# Altium footprint library 8x8LEDMATRIX.PcbLib: 1 footprints
Each footprint in its own frame and in the unit in brackets; x right, y up, seen from the top. Pads: shape width x height; smd on the part's side, far side on the other; paste and mask are expansions set on the pad; w line width, h text height; cw(c..) or ccw(c..) is an arc to the next point about the centre after c.
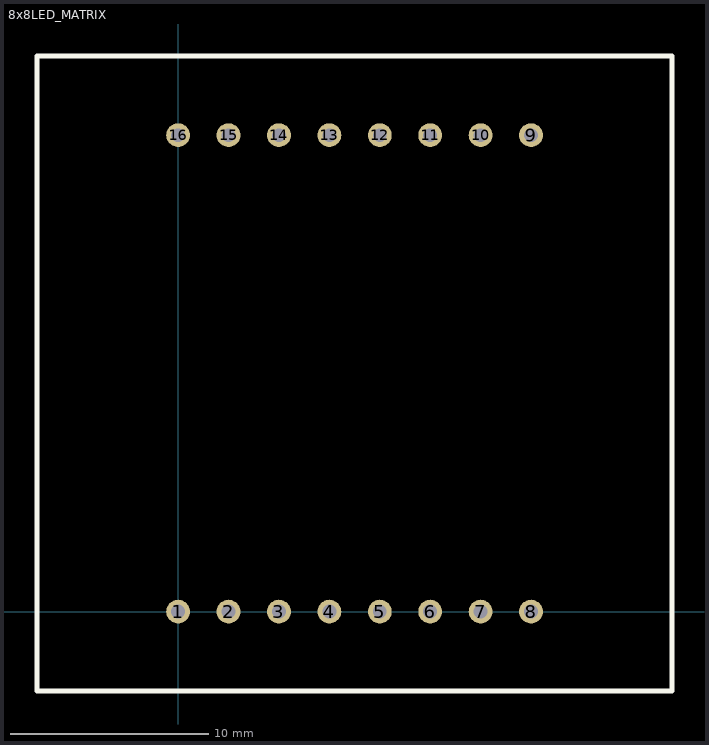
[diagram p0: the footprint, top view; thin cyan lines are the x and y axes]

## 8x8LED_MATRIX [mil]
pads (16):
  round 47.2 hole 27.6 paste-99999 mask+2: 1(0,0) 2(100,0) 3(200,0) 4(300,0) 5(400,0) 6(500,0) 7(600,0) 8(700,0) 9(700,944.9) 10(600,944.9) 11(500,944.9) 12(400,944.9) 13(300,944.9) 14(200,944.9) 15(100,944.9) 16(0,944.9)
Top Overlay:
  lines w10: -279.9,-157.4 979.9,-157.4 979.9,1102.4 -279.9,1102.4 -279.9,-157.4
Mechanical 6:
  lines w2: -279.9,-157.4 979.9,-157.4 979.9,1102.4 -279.9,1102.4 -279.9,-157.4
Mechanical 8:
  region: -277.6,-157.4 -278,-158.7 -279,-159.6 -280.3,-159.8 -281.5,-159.2 -282.2,-158.1 -282.2,-156.8 -281.5,-155.7 -280.3,-155.1 -279,-155.3 -278,-156.2
Mechanical 9:
  drawing of 16 lines, arcs and shapes, not listed
3D body "8x8-Dot-Matrix-LED.stp": height 276.52, standoff -136.87, extent -279.92,-154.92 979.92,1104.92